# Altium footprint library FootPrintLib_11.PcbLib: 376 footprints (part 20 of 24)
Each footprint in its own frame and in the unit in brackets; x right, y up, seen from the top. Pads: shape width x height; smd on the part's side, far side on the other; paste and mask are expansions set on the pad; w line width, h text height; cw(c..) or ccw(c..) is an arc to the next point about the centre after c.
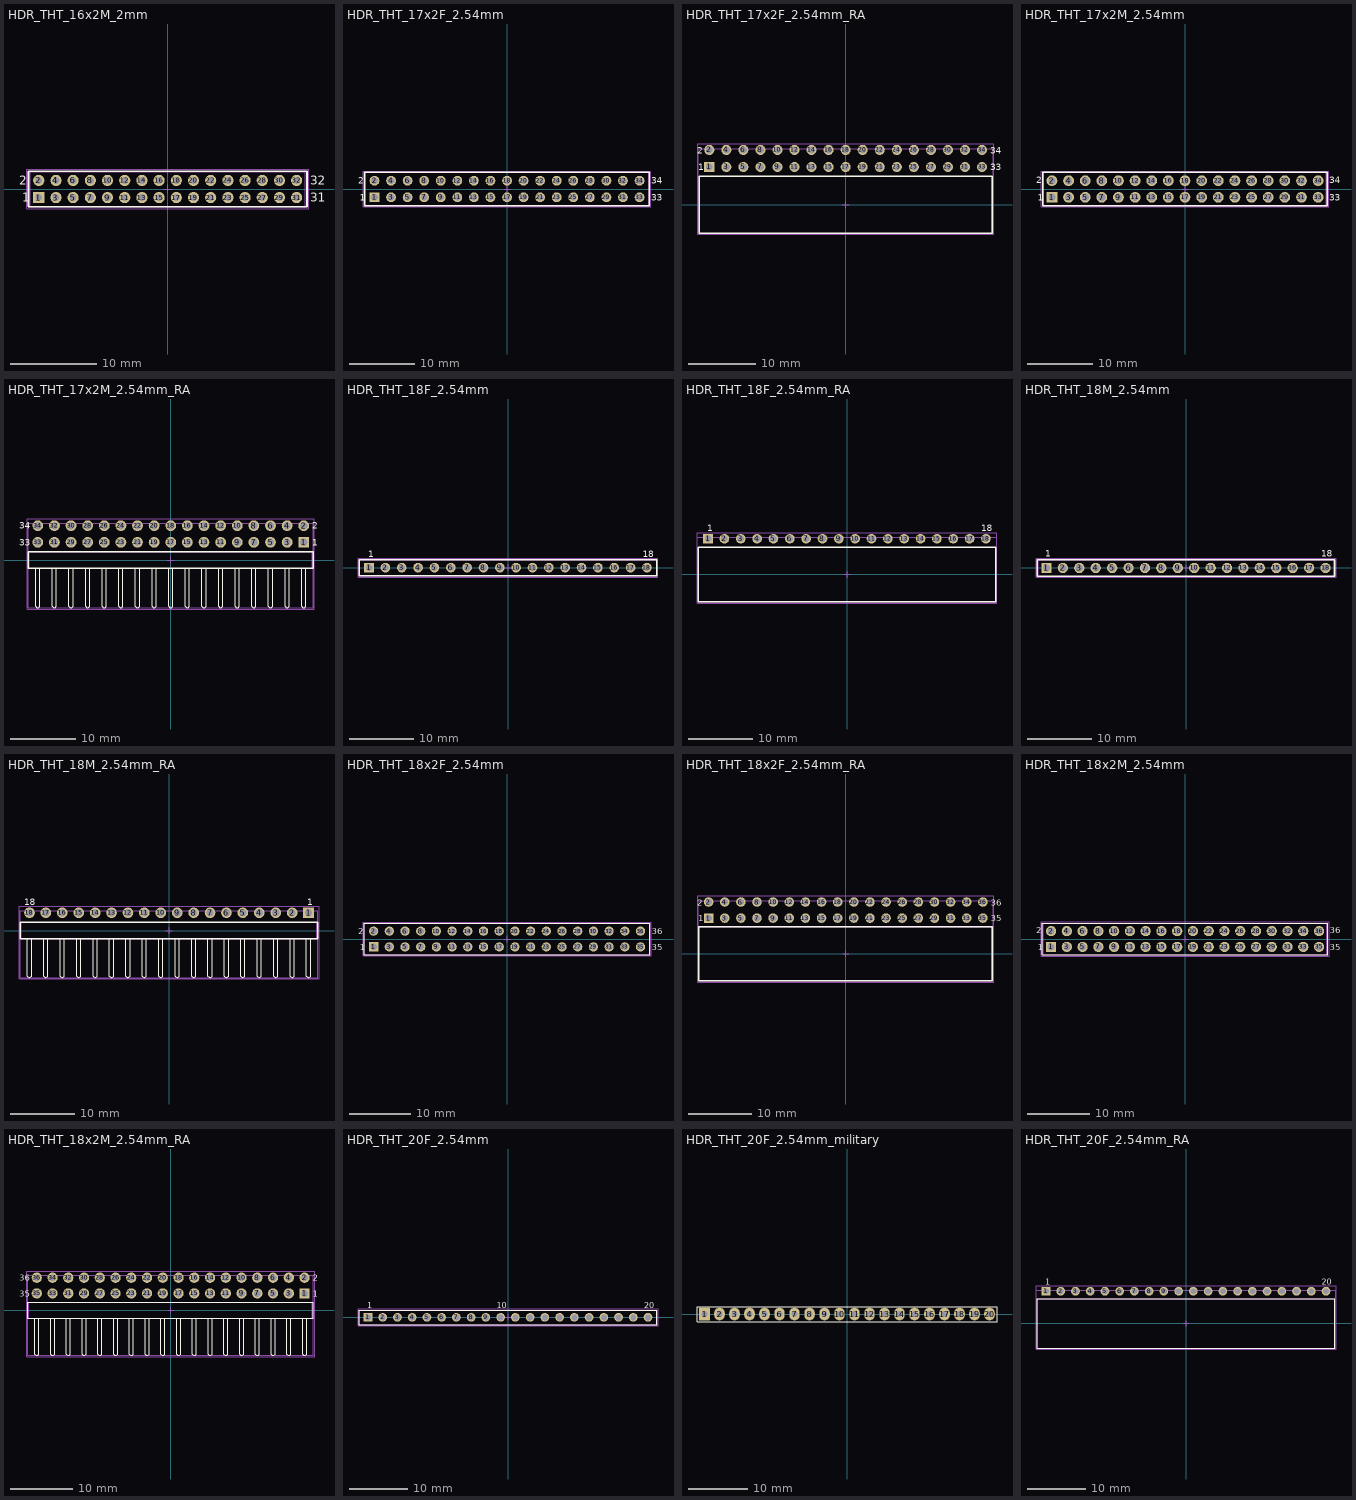
[diagram p19: the footprints below, top view; thin cyan lines are the x and y axes]

## HDR_THT_16x2M_2mm [mm] "2.00 mm THT Dual Pin Header, 32p"
height 6
pads (32):
  rect 1.3x1.3 hole 0.8: 1(-15,-1)
  round 1.3 hole 0.8: 2(-15,1) 3(-13,-1) 4(-13,1) 5(-11,-1) 6(-11,1) 7(-9,-1) 8(-9,1) 9(-7,-1) 10(-7,1) 11(-5,-1) 12(-5,1) 13(-3,-1) 14(-3,1) 15(-1,-1) 16(-1,1) 17(1,-1) 18(1,1) 19(3,-1) 20(3,1) 21(5,-1) 22(5,1) 23(7,-1) 24(7,1) 25(9,-1) 26(9,1) 27(11,-1) 28(11,1) 29(13,-1) 30(13,1) 31(15,-1) 32(15,1)
Top Overlay:
  lines w0.2: -16.2,-2.075 -16.2,2.075 16.2,2.075 16.2,-2.075 -16.2,-2.075
  text "1" at -16.9,-1.5 h1
  text "2" at -17.3,0.5 h1
  text "31" at 16.6,-1.5 h1
  text "32" at 16.6,0.5 h1
Mechanical 11:
  lines w0.1: -16,-2 -16,2 16,2 16,-2 -16,-2
Mechanical 13:
  lines w0.1: -16.2,-2.075 -16.2,2.075 16.2,2.075 16.2,-2.075 -16.2,-2.075
Mechanical 15:
  lines w0.1: -0.5,0 0.5,0 ; 0,-0.5 0,0.5 ; -16.4,-2.275 -16.4,2.275 16.4,2.275 16.4,-2.275 -16.4,-2.275
3D body "62003221121.stp": height 6.05, standoff -2.65, extent -16,-2 16,2

## HDR_THT_17x2F_2.54mm [mm] "Socket Header, Pitch 2.54 mm, THT, Vertical, dual row, 34p"
height 8.4
pads (34):
  rect 1.5x1.5 hole 1.02: 1(-20.32,-1.27)
  round 1.5 hole 1.02: 2(-20.32,1.27) 3(-17.78,-1.27) 4(-17.78,1.27) 5(-15.24,-1.27) 6(-15.24,1.27) 7(-12.7,-1.27) 8(-12.7,1.27) 9(-10.16,-1.27) 10(-10.16,1.27) 11(-7.62,-1.27) 12(-7.62,1.27) 13(-5.08,-1.27) 14(-5.08,1.27) 15(-2.54,-1.27) 16(-2.54,1.27) 17(0,-1.27) 18(0,1.27) 19(2.54,-1.27) 20(2.54,1.27) 21(5.08,-1.27) 22(5.08,1.27) 23(7.62,-1.27) 24(7.62,1.27) 25(10.16,-1.27) 26(10.16,1.27) 27(12.7,-1.27) 28(12.7,1.27) 29(15.24,-1.27) 30(15.24,1.27) 31(17.78,-1.27) 32(17.78,1.27) 33(20.32,-1.27) 34(20.32,1.27)
Top Overlay:
  lines w0.2: -21.84,-2.54 -21.84,2.54 21.84,2.54 21.84,-2.54 -21.84,-2.54
  text "2" at -22.85,0.8 h1
  text "1" at -22.55,-1.8 h1
  text "33" at 22.15,-1.8 h1
  text "34" at 22.15,0.8 h1
Mechanical 11:
  lines w0.1: -21.84,-2.54 21.84,-2.54 21.84,2.54 -21.84,2.54 -21.84,-2.54
Mechanical 13:
  lines w0.1: -21.965,-2.54 -21.965,2.54 21.965,2.54 21.965,-2.54 -21.965,-2.54
Mechanical 15:
  lines w0.1: -0.5,0 0.5,0 ; 0,-0.5 0,0.5 ; -22.04,-2.74 -22.04,2.74 22.04,2.74 22.04,-2.74 -22.04,-2.74
3D body "61303421821.stp": height 8.45, standoff -3.05, extent -21.84,-2.54 21.84,2.54

## HDR_THT_17x2F_2.54mm_RA [mm] "Socket Header, Pitch 2.54 mm, THT, Angled, dual row, 34p"
height 5.08
pads (34):
  rect 1.5x1.5 hole 1.02: 1(-20.32,5.61)
  round 1.5 hole 1.02: 2(-20.32,8.15) 3(-17.78,5.61) 4(-17.78,8.15) 5(-15.24,5.61) 6(-15.24,8.15) 7(-12.7,5.61) 8(-12.7,8.15) 9(-10.16,5.61) 10(-10.16,8.15) 11(-7.62,5.61) 12(-7.62,8.15) 13(-5.08,5.61) 14(-5.08,8.15) 15(-2.54,5.61) 16(-2.54,8.15) 17(0,5.61) 18(0,8.15) 19(2.54,5.61) 20(2.54,8.15) 21(5.08,5.61) 22(5.08,8.15) 23(7.62,5.61) 24(7.62,8.15) 25(10.16,5.61) 26(10.16,8.15) 27(12.7,5.61) 28(12.7,8.15) 29(15.24,5.61) 30(15.24,8.15) 31(17.78,5.61) 32(17.78,8.15) 33(20.32,5.61) 34(20.32,8.15)
Top Overlay:
  lines w0.2: -21.84,-4.25 -21.84,4.25 21.84,4.25 21.84,-4.25 -21.84,-4.25
  text "2" at -22.15,7.6 h1
  text "1" at -21.95,5.1 h1
  text "33" at 21.55,5.1 h1
  text "34" at 21.55,7.6 h1
Mechanical 11:
  lines w0.1: -21.84,-4.25 21.84,-4.25 21.84,4.25 -21.84,4.25 -21.84,-4.25
Mechanical 13:
  lines w0.1: -21.99,-4.25 21.99,-4.25 21.99,8.35 -21.99,8.35 -21.99,-4.25
Mechanical 15:
  lines w0.1: -0.5,0 0.5,0 ; 0,-0.5 0,0.5 ; -22.04,-4.45 22.04,-4.45 22.04,9.1 -22.04,9.1 -22.04,-4.45
3D body "613034243121.stp": height 5.05, standoff -3.25, extent -21.84,-4.25 21.84,8.35

## HDR_THT_17x2M_2.54mm [mm] "Pin Header, pitch 2.54 mm, THT, Vertical, dual row, 34p"
height 8.54
pads (34):
  rect 1.65x1.65 hole 1.1: 1(-20.32,-1.27)
  round 1.65 hole 1.1: 2(-20.32,1.27) 3(-17.78,-1.27) 4(-17.78,1.27) 5(-15.24,-1.27) 6(-15.24,1.27) 7(-12.7,-1.27) 8(-12.7,1.27) 9(-10.16,-1.27) 10(-10.16,1.27) 11(-7.62,-1.27) 12(-7.62,1.27) 13(-5.08,-1.27) 14(-5.08,1.27) 15(-2.54,-1.27) 16(-2.54,1.27) 17(0,-1.27) 18(0,1.27) 19(2.54,-1.27) 20(2.54,1.27) 21(5.08,-1.27) 22(5.08,1.27) 23(7.62,-1.27) 24(7.62,1.27) 25(10.16,-1.27) 26(10.16,1.27) 27(12.7,-1.27) 28(12.7,1.27) 29(15.24,-1.27) 30(15.24,1.27) 31(17.78,-1.27) 32(17.78,1.27) 33(20.32,-1.27) 34(20.32,1.27)
Top Overlay:
  lines w0.2: -21.74,-2.54 -21.74,2.54 21.74,2.54 21.74,-2.54 -21.74,-2.54
  text "2" at -22.75,0.9 h1
  text "1" at -22.45,-1.8 h1
  text "33" at 22.05,-1.8 h1
  text "34" at 22.05,0.9 h1
Mechanical 11:
  lines w0.1: -21.59,-2.54 -21.59,2.54 21.59,2.54 21.59,-2.54 -21.59,-2.54
Mechanical 13:
  lines w0.1: -21.74,-2.54 -21.74,2.54 21.74,2.54 21.74,-2.54 -21.74,-2.54
Mechanical 15:
  lines w0.1: -0.5,0 0.5,0 ; 0,-0.5 0,0.5 ; -21.94,-2.74 -21.94,2.74 21.94,2.74 21.94,-2.74 -21.94,-2.74
3D body "61303421121.stp": height 8.59, standoff -2.95, extent -21.59,-2.54 21.59,2.54

## HDR_THT_17x2M_2.54mm_RA [mm] "Pin Header, pitch 2.54 mm, THT, Angled, dual row, 34p"
height 5.08
pads (34):
  rect 1.65x1.65 hole 1.1: 1(20.32,2.73)
  round 1.65 hole 1.1: 2(20.32,5.27) 3(17.78,2.73) 4(17.78,5.27) 5(15.24,2.73) 6(15.24,5.27) 7(12.7,2.73) 8(12.7,5.27) 9(10.16,2.73) 10(10.16,5.27) 11(7.62,2.73) 12(7.62,5.27) 13(5.08,2.73) 14(5.08,5.27) 15(2.54,2.73) 16(2.54,5.27) 17(0,2.73) 18(0,5.27) 19(-2.54,2.73) 20(-2.54,5.27) 21(-5.08,2.73) 22(-5.08,5.27) 23(-7.62,2.73) 24(-7.62,5.27) 25(-10.16,2.73) 26(-10.16,5.27) 27(-12.7,2.73) 28(-12.7,5.27) 29(-15.24,2.73) 30(-15.24,5.27) 31(-17.78,2.73) 32(-17.78,5.27) 33(-20.32,2.73) 34(-20.32,5.27)
Top Overlay:
  lines w0.15: -20.64,-1.335 -20.64,-7.07 -20.44,-7.27 -20.2,-7.27 -20,-7.07 -20,-1.31 ; -18.1,-1.335 -18.1,-7.07 -17.9,-7.27 -17.66,-7.27 -17.46,-7.07 -17.46,-1.31 ; -15.56,-1.335 -15.56,-7.07 -15.36,-7.27 -15.12,-7.27 -14.92,-7.07 -14.92,-1.31 ; -13.02,-1.335 -13.02,-7.07 -12.82,-7.27 -12.58,-7.27 -12.38,-7.07 -12.38,-1.31 ; -10.48,-1.335 -10.48,-7.07 -10.28,-7.27 -10.04,-7.27 -9.84,-7.07 -9.84,-1.31 ; -7.94,-1.335 -7.94,-7.07 -7.74,-7.27 -7.5,-7.27 -7.3,-7.07 -7.3,-1.31 ; -5.4,-1.335 -5.4,-7.07 -5.2,-7.27 -4.96,-7.27 -4.76,-7.07 -4.76,-1.31 ; -2.86,-1.335 -2.86,-7.07 -2.66,-7.27 -2.42,-7.27 -2.22,-7.07 -2.22,-1.31 ; -0.32,-1.335 -0.32,-7.07 -0.12,-7.27 0.12,-7.27 0.32,-7.07 0.32,-1.31 ; 2.22,-1.335 2.22,-7.07 2.42,-7.27 2.66,-7.27 2.86,-7.07 2.86,-1.31 ; 4.76,-1.335 4.76,-7.07 4.96,-7.27 5.2,-7.27 5.4,-7.07 5.4,-1.31 ; 7.3,-1.335 7.3,-7.07 7.5,-7.27 7.74,-7.27 7.94,-7.07 7.94,-1.31 ; 9.84,-1.335 9.84,-7.07 10.04,-7.27 10.28,-7.27 10.48,-7.07 10.48,-1.31 ; 12.38,-1.335 12.38,-7.07 12.58,-7.27 12.82,-7.27 13.02,-7.07 13.02,-1.31 ; 14.92,-1.335 14.92,-7.07 15.12,-7.27 15.36,-7.27 15.56,-7.07 15.56,-1.31 ; 17.46,-1.335 17.46,-7.07 17.66,-7.27 17.9,-7.27 18.1,-7.07 18.1,-1.31 ; 20,-1.335 20,-7.07 20.2,-7.27 20.44,-7.27 20.64,-7.07 20.64,-1.31
  lines w0.2: -21.74,-1.27 21.74,-1.27 21.74,1.27 -21.74,1.27 -21.74,-1.27
  text "34" at -23.19,4.8 h1
  text "33" at -23.19,2.2 h1
  text "2" at 21.65,4.8 h1
  text "1" at 21.65,2.2 h1
Mechanical 11:
  lines w0.1: -21.59,-1.27 21.59,-1.27 21.59,1.27 -21.59,1.27 -21.59,-1.27
Mechanical 13:
  lines w0.1: -21.74,-7.27 -21.74,5.63 21.74,5.63 21.74,-7.27 -21.74,-7.27
Mechanical 15:
  lines w0.1: -0.5,0 0.5,0 ; 0,-0.5 0,0.5 ; -21.94,-7.47 -21.94,6.295 21.94,6.295 21.94,-7.47 -21.94,-7.47
3D body "61303421021.stp": height 5.14, standoff -2.94, extent -21.59,-7.27 21.59,5.63

## HDR_THT_18F_2.54mm [mm] "Socket Header, Pitch 2.54 mm, THT, Vertical, single row, 18p"
height 8.5
pads (18):
  rect 1.5x1.5 hole 1.02: 1(-21.59,0)
  round 1.5 hole 1.02: 2(-19.05,0) 3(-16.51,0) 4(-13.97,0) 5(-11.43,0) 6(-8.89,0) 7(-6.35,0) 8(-3.81,0) 9(-1.27,0) 10(1.27,0) 11(3.81,0) 12(6.35,0) 13(8.89,0) 14(11.43,0) 15(13.97,0) 16(16.51,0) 17(19.05,0) 18(21.59,0)
Top Overlay:
  lines w0.2: -23.11,-1.25 23.11,-1.25 23.11,1.25 -23.11,1.25 -23.11,-1.25
  text "18" at 20.96,1.6 h1
  text "1" at -21.68,1.6 h1
Mechanical 11:
  lines w0.1: -23.11,-1.25 23.11,-1.25 23.11,1.25 -23.11,1.25 -23.11,-1.25
Mechanical 13:
  lines w0.1: -23.235,-1.25 -23.235,1.25 23.235,1.25 23.235,-1.25 -23.235,-1.25
Mechanical 15:
  lines w0.1: -0.5,0 0.5,0 ; 0,-0.5 0,0.5 ; -23.31,-1.45 -23.31,1.45 23.31,1.45 23.31,-1.45 -23.31,-1.45
3D body "61301811821.stp": height 8.55, standoff -3.06, extent -23.11,-1.25 23.11,1.25

## HDR_THT_18F_2.54mm_RA [mm] "Socket Header, Pitch 2.54 mm, THT, Angled, single row, 18p"
height 2.5
pads (18):
  rect 1.5x1.5 hole 1.02: 1(-21.59,5.55)
  round 1.5 hole 1.02: 2(-19.05,5.55) 3(-16.51,5.55) 4(-13.97,5.55) 5(-11.43,5.55) 6(-8.89,5.55) 7(-6.35,5.55) 8(-3.81,5.55) 9(-1.27,5.55) 10(1.27,5.55) 11(3.81,5.55) 12(6.35,5.55) 13(8.89,5.55) 14(11.43,5.55) 15(13.97,5.55) 16(16.51,5.55) 17(19.05,5.55) 18(21.59,5.55)
Top Overlay:
  lines w0.2: -23.11,-4.25 -23.11,4.25 23.11,4.25 23.11,-4.25 -23.11,-4.25
  text "1" at -21.75,6.7 h1
  text "18" at 20.85,6.7 h1
Mechanical 11:
  lines w0.1: -23.11,-4.25 23.11,-4.25 23.11,4.25 -23.11,4.25 -23.11,-4.25
Mechanical 13:
  lines w0.1: -23.235,-4.25 -23.235,5.75 23.235,5.75 23.235,-4.25 -23.235,-4.25
Mechanical 15:
  lines w0.1: -0.5,0 0.5,0 ; 0,-0.5 0,0.5 ; -23.31,-4.45 -23.31,6.5 23.31,6.5 23.31,-4.45 -23.31,-4.45
3D body "613018143121.stp": height 2.55, standoff -3.04, extent -23.11,-4.25 23.11,5.75

## HDR_THT_18M_2.54mm [mm] "Pin Header, pitch 2.54 mm, THT, Vertical, single row, 18p"
height 8.54
pads (18):
  rect 1.6x1.6 hole 1.1: 1(-21.59,0)
  round 1.6 hole 1.1: 2(-19.05,0) 3(-16.51,0) 4(-13.97,0) 5(-11.43,0) 6(-8.89,0) 7(-6.35,0) 8(-3.81,0) 9(-1.27,0) 10(1.27,0) 11(3.81,0) 12(6.35,0) 13(8.89,0) 14(11.43,0) 15(13.97,0) 16(16.51,0) 17(19.05,0) 18(21.59,0)
Top Overlay:
  lines w0.2: -23.01,-1.27 -23.01,1.27 23.01,1.27 23.01,-1.27 -23.01,-1.27
  text "18" at 20.96,1.7 h1
  text "1" at -21.78,1.7 h1
Mechanical 11:
  lines w0.1: -22.86,-1.27 22.86,-1.27 22.86,1.27 -22.86,1.27 -22.86,-1.27
Mechanical 13:
  lines w0.1: -23.01,-1.27 -23.01,1.27 23.01,1.27 23.01,-1.27 -23.01,-1.27
Mechanical 15:
  lines w0.1: -0.5,0 0.5,0 ; 0,-0.5 0,0.5 ; -23.21,-1.47 -23.21,1.47 23.21,1.47 23.21,-1.47 -23.21,-1.47
3D body "61301811121.stp": height 8.57, standoff -2.97, extent -22.86,-1.27 22.86,1.27

## HDR_THT_18M_2.54mm_RA [mm] "Pin Header, pitch 2.54 mm, THT, Angled, single row, 18p"
height 2.54
pads (18):
  rect 1.65x1.65 hole 1.1: 1(21.59,2.77)
  round 1.65 hole 1.1: 2(19.05,2.77) 3(16.51,2.77) 4(13.97,2.77) 5(11.43,2.77) 6(8.89,2.77) 7(6.35,2.77) 8(3.81,2.77) 9(1.27,2.77) 10(-1.27,2.77) 11(-3.81,2.77) 12(-6.35,2.77) 13(-8.89,2.77) 14(-11.43,2.77) 15(-13.97,2.77) 16(-16.51,2.77) 17(-19.05,2.77) 18(-21.59,2.77)
Top Overlay:
  lines w0.15: -21.91,-1.27 -21.91,-7.07 -21.59,-7.27 -21.27,-7.07 -21.27,-1.27 ; -19.37,-1.27 -19.37,-7.07 -19.05,-7.27 -18.73,-7.07 -18.73,-1.27 ; -16.83,-1.27 -16.83,-7.07 -16.51,-7.27 -16.19,-7.07 -16.19,-1.27 ; -14.29,-1.27 -14.29,-7.07 -13.97,-7.27 -13.65,-7.07 -13.65,-1.27 ; -11.75,-1.27 -11.75,-7.07 -11.43,-7.27 -11.11,-7.07 -11.11,-1.27 ; -9.21,-1.27 -9.21,-7.07 -8.89,-7.27 -8.57,-7.07 -8.57,-1.27 ; -6.67,-1.27 -6.67,-7.07 -6.35,-7.27 -6.03,-7.07 -6.03,-1.27 ; -4.13,-1.27 -4.13,-7.07 -3.81,-7.27 -3.49,-7.07 -3.49,-1.27 ; -1.59,-1.27 -1.59,-7.07 -1.27,-7.27 -0.95,-7.07 -0.95,-1.27 ; 0.95,-1.27 0.95,-7.07 1.27,-7.27 1.59,-7.07 1.59,-1.27 ; 3.49,-1.27 3.49,-7.07 3.81,-7.27 4.13,-7.07 4.13,-1.27 ; 6.03,-1.27 6.03,-7.07 6.35,-7.27 6.67,-7.07 6.67,-1.27 ; 8.57,-1.27 8.57,-7.07 8.89,-7.27 9.21,-7.07 9.21,-1.27 ; 11.11,-1.27 11.11,-7.07 11.43,-7.27 11.75,-7.07 11.75,-1.27 ; 13.65,-1.27 13.65,-7.07 13.97,-7.27 14.29,-7.07 14.29,-1.27 ; 16.19,-1.27 16.19,-7.07 16.51,-7.27 16.83,-7.07 16.83,-1.27 ; 18.73,-1.27 18.73,-7.07 19.05,-7.27 19.37,-7.07 19.37,-1.27 ; 21.27,-1.27 21.27,-7.07 21.59,-7.27 21.91,-7.07 21.91,-1.27
  lines w0.2: -23.01,-1.27 -23.01,1.27 23.01,1.27 23.01,-1.27 -23.01,-1.27
  text "1" at 21.42,3.9 h1
  text "18" at -22.36,3.9 h1
Mechanical 11:
  lines w0.1: -22.86,-1.27 -22.86,1.27 22.86,1.27 22.86,-1.27 -22.86,-1.27
Mechanical 13:
  lines w0.1: -23.01,-7.27 23.01,-7.27 23.01,3.09 -23.01,3.09 -23.01,-7.27
Mechanical 15:
  lines w0.1: -0.5,0 0.5,0 ; 0,-0.5 0,0.5 ; -23.21,-7.47 23.21,-7.47 23.21,3.795 -23.21,3.795 -23.21,-7.47
3D body "61301811021.stp": height 2.62, standoff -2.92, extent -22.86,-7.27 22.86,3.09

## HDR_THT_18x2F_2.54mm [mm] "Socket Header, Pitch 2.54 mm, THT, Vertical, dual row, 36p"
height 8.4
pads (36):
  rect 1.5x1.5 hole 1.02: 1(-21.59,-1.27)
  round 1.5 hole 1.02: 2(-21.59,1.27) 3(-19.05,-1.27) 4(-19.05,1.27) 5(-16.51,-1.27) 6(-16.51,1.27) 7(-13.97,-1.27) 8(-13.97,1.27) 9(-11.43,-1.27) 10(-11.43,1.27) 11(-8.89,-1.27) 12(-8.89,1.27) 13(-6.35,-1.27) 14(-6.35,1.27) 15(-3.81,-1.27) 16(-3.81,1.27) 17(-1.27,-1.27) 18(-1.27,1.27) 19(1.27,-1.27) 20(1.27,1.27) 21(3.81,-1.27) 22(3.81,1.27) 23(6.35,-1.27) 24(6.35,1.27) 25(8.89,-1.27) 26(8.89,1.27) 27(11.43,-1.27) 28(11.43,1.27) 29(13.97,-1.27) 30(13.97,1.27) 31(16.51,-1.27) 32(16.51,1.27) 33(19.05,-1.27) 34(19.05,1.27) 35(21.59,-1.27) 36(21.59,1.27)
Top Overlay:
  lines w0.2: -23.11,-2.54 23.11,-2.54 23.11,2.54 -23.11,2.54 -23.11,-2.54
  text "36" at 23.42,0.8 h1
  text "35" at 23.42,-1.8 h1
  text "1" at -23.82,-1.8 h1
  text "2" at -24.12,0.8 h1
Mechanical 11:
  lines w0.1: -23.11,-2.54 -23.11,2.54 23.11,2.54 23.11,-2.54 -23.11,-2.54
Mechanical 13:
  lines w0.1: -23.235,-2.54 23.235,-2.54 23.235,2.54 -23.235,2.54 -23.235,-2.54
Mechanical 15:
  lines w0.1: -0.5,0 0.5,0 ; 0,-0.5 0,0.5 ; -23.31,-2.74 23.31,-2.74 23.31,2.74 -23.31,2.74 -23.31,-2.74
3D body "61303621821.stp": height 8.45, standoff -3.05, extent -23.11,-2.54 23.11,2.54

## HDR_THT_18x2F_2.54mm_RA [mm] "Socket Header, Pitch 2.54 mm, THT, Angled, dual row, 36p"
height 5.08
pads (36):
  rect 1.5x1.5 hole 1.02: 1(-21.59,5.61)
  round 1.5 hole 1.02: 2(-21.59,8.15) 3(-19.05,5.61) 4(-19.05,8.15) 5(-16.51,5.61) 6(-16.51,8.15) 7(-13.97,5.61) 8(-13.97,8.15) 9(-11.43,5.61) 10(-11.43,8.15) 11(-8.89,5.61) 12(-8.89,8.15) 13(-6.35,5.61) 14(-6.35,8.15) 15(-3.81,5.61) 16(-3.81,8.15) 17(-1.27,5.61) 18(-1.27,8.15) 19(1.27,5.61) 20(1.27,8.15) 21(3.81,5.61) 22(3.81,8.15) 23(6.35,5.61) 24(6.35,8.15) 25(8.89,5.61) 26(8.89,8.15) 27(11.43,5.61) 28(11.43,8.15) 29(13.97,5.61) 30(13.97,8.15) 31(16.51,5.61) 32(16.51,8.15) 33(19.05,5.61) 34(19.05,8.15) 35(21.59,5.61) 36(21.59,8.15)
Top Overlay:
  lines w0.2: -23.11,-4.25 -23.11,4.25 23.11,4.25 23.11,-4.25 -23.11,-4.25
  text "2" at -23.42,7.6 h1
  text "1" at -23.22,5.1 h1
  text "35" at 22.82,5.1 h1
  text "36" at 22.82,7.6 h1
Mechanical 11:
  lines w0.1: -23.11,-4.25 23.11,-4.25 23.11,4.25 -23.11,4.25 -23.11,-4.25
Mechanical 13:
  lines w0.1: -23.26,-4.25 23.26,-4.25 23.26,8.35 -23.26,8.35 -23.26,-4.25
Mechanical 15:
  lines w0.1: -0.5,0 0.5,0 ; 0,-0.5 0,0.5 ; -23.31,-4.45 23.31,-4.45 23.31,9.1 -23.31,9.1 -23.31,-4.45
3D body "613036243121.stp": height 5.05, standoff -3.25, extent -23.11,-4.25 23.11,8.35

## HDR_THT_18x2M_2.54mm [mm] "Pin Header, pitch 2.54 mm, THT, Vertical, dual row, 36p"
height 8.54
pads (36):
  rect 1.65x1.65 hole 1.1: 1(-21.59,-1.27)
  round 1.65 hole 1.1: 2(-21.59,1.27) 3(-19.05,-1.27) 4(-19.05,1.27) 5(-16.51,-1.27) 6(-16.51,1.27) 7(-13.97,-1.27) 8(-13.97,1.27) 9(-11.43,-1.27) 10(-11.43,1.27) 11(-8.89,-1.27) 12(-8.89,1.27) 13(-6.35,-1.27) 14(-6.35,1.27) 15(-3.81,-1.27) 16(-3.81,1.27) 17(-1.27,-1.27) 18(-1.27,1.27) 19(1.27,-1.27) 20(1.27,1.27) 21(3.81,-1.27) 22(3.81,1.27) 23(6.35,-1.27) 24(6.35,1.27) 25(8.89,-1.27) 26(8.89,1.27) 27(11.43,-1.27) 28(11.43,1.27) 29(13.97,-1.27) 30(13.97,1.27) 31(16.51,-1.27) 32(16.51,1.27) 33(19.05,-1.27) 34(19.05,1.27) 35(21.59,-1.27) 36(21.59,1.27)
Top Overlay:
  lines w0.2: -23.01,-2.54 23.01,-2.54 23.01,2.54 -23.01,2.54 -23.01,-2.54
  text "36" at 23.32,0.9 h1
  text "35" at 23.32,-1.8 h1
  text "1" at -23.72,-1.8 h1
  text "2" at -24.02,0.9 h1
Mechanical 11:
  lines w0.1: -22.86,-2.54 22.86,-2.54 22.86,2.54 -22.86,2.54 -22.86,-2.54
Mechanical 13:
  lines w0.1: -23.01,-2.54 23.01,-2.54 23.01,2.54 -23.01,2.54 -23.01,-2.54
Mechanical 15:
  lines w0.1: -0.5,0 0.5,0 ; 0,-0.5 0,0.5 ; -23.21,-2.74 23.21,-2.74 23.21,2.74 -23.21,2.74 -23.21,-2.74
3D body "61303621121.stp": height 8.59, standoff -2.95, extent -22.86,-2.54 22.86,2.54

## HDR_THT_18x2M_2.54mm_RA [mm] "Pin Header, pitch 2.54 mm, THT, Angled, dual row, 36p"
height 5.08
pads (36):
  rect 1.65x1.65 hole 1.1: 1(21.59,2.73)
  round 1.65 hole 1.1: 2(21.59,5.27) 3(19.05,2.73) 4(19.05,5.27) 5(16.51,2.73) 6(16.51,5.27) 7(13.97,2.73) 8(13.97,5.27) 9(11.43,2.73) 10(11.43,5.27) 11(8.89,2.73) 12(8.89,5.27) 13(6.35,2.73) 14(6.35,5.27) 15(3.81,2.73) 16(3.81,5.27) 17(1.27,2.73) 18(1.27,5.27) 19(-1.27,2.73) 20(-1.27,5.27) 21(-3.81,2.73) 22(-3.81,5.27) 23(-6.35,2.73) 24(-6.35,5.27) 25(-8.89,2.73) 26(-8.89,5.27) 27(-11.43,2.73) 28(-11.43,5.27) 29(-13.97,2.73) 30(-13.97,5.27) 31(-16.51,2.73) 32(-16.51,5.27) 33(-19.05,2.73) 34(-19.05,5.27) 35(-21.59,2.73) 36(-21.59,5.27)
Top Overlay:
  lines w0.15: -21.91,-1.335 -21.91,-7.07 -21.71,-7.27 -21.47,-7.27 -21.27,-7.07 -21.27,-1.31 ; -19.37,-1.335 -19.37,-7.07 -19.17,-7.27 -18.93,-7.27 -18.73,-7.07 -18.73,-1.31 ; -16.83,-1.335 -16.83,-7.07 -16.63,-7.27 -16.39,-7.27 -16.19,-7.07 -16.19,-1.31 ; -14.29,-1.335 -14.29,-7.07 -14.09,-7.27 -13.85,-7.27 -13.65,-7.07 -13.65,-1.31 ; -11.75,-1.335 -11.75,-7.07 -11.55,-7.27 -11.31,-7.27 -11.11,-7.07 -11.11,-1.31 ; -9.21,-1.335 -9.21,-7.07 -9.01,-7.27 -8.77,-7.27 -8.57,-7.07 -8.57,-1.31 ; -6.67,-1.335 -6.67,-7.07 -6.47,-7.27 -6.23,-7.27 -6.03,-7.07 -6.03,-1.31 ; -4.13,-1.335 -4.13,-7.07 -3.93,-7.27 -3.69,-7.27 -3.49,-7.07 -3.49,-1.31 ; -1.59,-1.335 -1.59,-7.07 -1.39,-7.27 -1.15,-7.27 -0.95,-7.07 -0.95,-1.31 ; 0.95,-1.335 0.95,-7.07 1.15,-7.27 1.39,-7.27 1.59,-7.07 1.59,-1.31 ; 3.49,-1.335 3.49,-7.07 3.69,-7.27 3.93,-7.27 4.13,-7.07 4.13,-1.31 ; 6.03,-1.335 6.03,-7.07 6.23,-7.27 6.47,-7.27 6.67,-7.07 6.67,-1.31 ; 8.57,-1.335 8.57,-7.07 8.77,-7.27 9.01,-7.27 9.21,-7.07 9.21,-1.31 ; 11.11,-1.335 11.11,-7.07 11.31,-7.27 11.55,-7.27 11.75,-7.07 11.75,-1.31 ; 13.65,-1.335 13.65,-7.07 13.85,-7.27 14.09,-7.27 14.29,-7.07 14.29,-1.31 ; 16.19,-1.335 16.19,-7.07 16.39,-7.27 16.63,-7.27 16.83,-7.07 16.83,-1.31 ; 18.73,-1.335 18.73,-7.07 18.93,-7.27 19.17,-7.27 19.37,-7.07 19.37,-1.31 ; 21.27,-1.335 21.27,-7.07 21.47,-7.27 21.71,-7.27 21.91,-7.07 21.91,-1.31
  lines w0.2: -23.01,-1.27 23.01,-1.27 23.01,1.27 -23.01,1.27 -23.01,-1.27
  text "36" at -24.46,4.8 h1
  text "35" at -24.46,2.2 h1
  text "2" at 22.92,4.8 h1
  text "1" at 22.92,2.2 h1
Mechanical 11:
  lines w0.1: -22.86,-1.27 22.86,-1.27 22.86,1.27 -22.86,1.27 -22.86,-1.27
Mechanical 13:
  lines w0.1: -23.01,-7.27 -23.01,5.63 23.01,5.63 23.01,-7.27 -23.01,-7.27
Mechanical 15:
  lines w0.1: -0.5,0 0.5,0 ; 0,-0.5 0,0.5 ; -23.21,-7.47 -23.21,6.295 23.21,6.295 23.21,-7.47 -23.21,-7.47
3D body "61303621021.stp": height 5.14, standoff -2.94, extent -22.86,-7.27 22.86,5.63

## HDR_THT_20F_2.54mm [mm] "Socket Header, Pitch 2.54 mm, THT, Vertical, single row, 20p"
height 8.5
pads (20):
  rect 1.5x1.5 hole 1.02: 1(-24.13,0)
  round 1.5 hole 1.02: 2(-21.59,0) 3(-19.05,0) 4(-16.51,0) 5(-13.97,0) 6(-11.43,0) 7(-8.89,0) 8(-6.35,0) 9(-3.81,0) 10(-1.27,0) 11(1.27,0) 12(3.81,0) 13(6.35,0) 14(8.89,0) 15(11.43,0) 16(13.97,0) 17(16.51,0) 18(19.05,0) 19(21.59,0) 20(24.13,0)
Top Overlay:
  lines w0.2: -25.65,-1.25 -25.65,1.25 25.65,1.25 25.65,-1.25 -25.65,-1.25
  text "1" at -24.22,1.6 h1
  text "20" at 23.5,1.6 h1
  text "10" at -1.9,1.6 h1
Mechanical 11:
  lines w0.1: -25.65,-1.25 -25.65,1.25 25.65,1.25 25.65,-1.25 -25.65,-1.25
Mechanical 13:
  lines w0.1: -25.775,-1.25 25.775,-1.25 25.775,1.25 -25.775,1.25 -25.775,-1.25
Mechanical 15:
  lines w0.1: -0.5,0 0.5,0 ; 0,-0.5 0,0.5 ; -25.85,-1.45 25.85,-1.45 25.85,1.45 -25.85,1.45 -25.85,-1.45
3D body "61302011821.stp": height 8.55, standoff -3.06, extent -25.65,-1.25 25.65,1.25

## HDR_THT_20F_2.54mm_military [mil] "Pin Header, pitch 2.54 mm, THT, Vertical, single row, 20p"
pads (20):
  rect 70x85 hole 39.37: 1(-950,0)
  oval 70x85 hole 39.37: 2(-850,0) 3(-750,0) 4(-650,0) 5(-550,0) 6(-450,0) 7(-350,0) 8(-250,0) 9(-150,0) 10(-50,0) 11(50,0) 12(150,0) 13(250,0) 14(350,0) 15(450,0) 16(550,0) 17(650,0) 18(750,0) 19(850,0) 20(950,0)
Top Overlay:
  lines w7.87: -1000,-50 -1000,50 1000,50 1000,-50 -1000,-50
3D body "User Library-RM254_4pin.STEP": height 237.01, standoff -122.05, extent -1000,-51.97 -600,48.03
3D body "User Library-RM254_4pin.STEP": height 237.01, standoff -122.05, extent -600,-51.97 -200,48.03
3D body "User Library-RM254_4pin.STEP": height 237.01, standoff -122.05, extent -200,-51.97 200,48.03
3D body "User Library-RM254_4pin.STEP": height 237.01, standoff -122.05, extent 200,-51.97 600,48.03
3D body "User Library-RM254_4pin.STEP": height 237.01, standoff -122.05, extent 600,-51.97 1000,48.03

## HDR_THT_20F_2.54mm_RA [mm] "Socket Header, Pitch 2.54 mm, THT, Angled, single row, 20p"
height 2.5
pads (20):
  rect 1.5x1.5 hole 1.02: 1(-24.13,5.55)
  round 1.5 hole 1.02: 2(-21.59,5.55) 3(-19.05,5.55) 4(-16.51,5.55) 5(-13.97,5.55) 6(-11.43,5.55) 7(-8.89,5.55) 8(-6.35,5.55) 9(-3.81,5.55) 10(-1.27,5.55) 11(1.27,5.55) 12(3.81,5.55) 13(6.35,5.55) 14(8.89,5.55) 15(11.43,5.55) 16(13.97,5.55) 17(16.51,5.55) 18(19.05,5.55) 19(21.59,5.55) 20(24.13,5.55)
Top Overlay:
  lines w0.2: -25.65,-4.25 -25.65,4.25 25.65,4.25 25.65,-4.25 -25.65,-4.25
  text "1" at -24.29,6.7 h1
  text "20" at 23.39,6.7 h1
Mechanical 11:
  lines w0.1: -25.65,-4.25 25.65,-4.25 25.65,4.25 -25.65,4.25 -25.65,-4.25
Mechanical 13:
  lines w0.1: -25.775,-4.25 -25.775,5.75 25.775,5.75 25.775,-4.25 -25.775,-4.25
Mechanical 15:
  lines w0.1: -0.5,0 0.5,0 ; 0,-0.5 0,0.5 ; -25.85,-4.45 -25.85,6.5 25.85,6.5 25.85,-4.45 -25.85,-4.45
3D body "613020143121.stp": height 2.55, standoff -3.04, extent -25.65,-4.25 25.65,5.75